# Altium schematic symbol library MyLibrary.SCHLIB: 89 symbols (part 3 of 3)
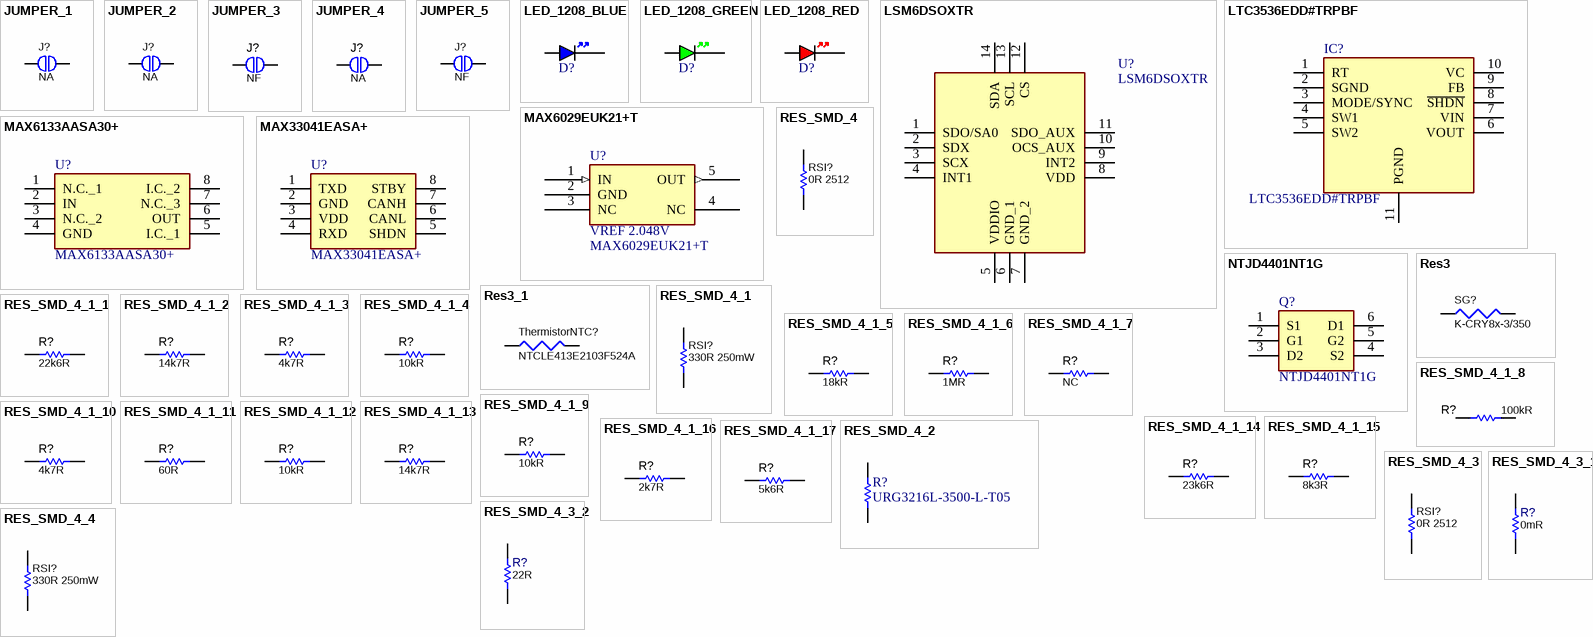
[diagram p4: symbols JUMPER_1 to RES_SMD_4_4]

## RES_SMD_4_3
designator RSI?, comment 0R 2512
Resistor SMD 6332mm (2512mil) 0Ohms 1W 5%; Manufacturer: Bourns; Manufacturer Part Number: CR2512-J/-000ELF; Value: =Resistance; ComponentLink1Description: Manufacturer 1 Product Page; ComponentLink1URL: k; ComponentLink2Description: Manufacturer 1 Product Datasheet 1; ComponentLink2URL: k; ComponentLink3Description: Supplier 1 Product Page; ComponentLink3URL: k; ComponentLink4Description: Supplier 1 Product Datasheet 1; ComponentLink4URL: k; Category: Resistor; Height: *
simulation model RESISTOR (Resistor)
signal-integrity model Res
footprint RESC1608M (Chip Resistor, Body 1.6x0.8mm, IPC Low Density)
footprint RESC0603M (Footprint not found)
footprint RESC1005M (Chip Resistor, Body 1.1x0.5mm, IPC Low Density)
footprint RESC2012M (Chip Resistor, Body 2.0x1.3mm, IPC Low Density)
footprint RESC3216M (Chip Resistor, Body 3.2x1.6mm, IPC Low Density)
footprint RESC3225M (Chip Resistor, Body 3.2x2.5mm, IPC Low Density)
footprint RESC4532M (Chip Resistor, Body 4.5x3.2mm, IPC Low Density)
footprint RESC5025M (Chip Resistor, Body 5.0x2.5mm, IPC Low Density)
footprint RESC6332M (Chip Resistor, Body 6.3x3.2mm, IPC Low Density)
footprint RESC1005N (Chip Resistor, Body 1.1x0.5mm, IPC Medium Density)
pins: 1, 2

## RES_SMD_4_3_1
designator R?, comment value 0mR  (hidden comment: Resistor SMD 1005mm (0402mil) 0Ohms 62.5mW 5% 100ppm/oC 50V)
Manufacturer 1: Vishay; Manufacturer Part Number 1: CRCW04020000Z0ED; Power Rating: 63mW; Temperature Coefficient: 100ppm/°C; ComponentLink1Description: Manufacturer 1 Product Page; ComponentLink1URL: https://www.vishay.com/product?docid=20035; ComponentLink2Description: Manufacturer 1 Product Datasheet 1; ComponentLink2URL: https://www.vishay.com/docs/20035/dcrcwe3.pdf; ComponentLink3Description: Supplier 1 Product Page; ComponentLink3URL: https://www.mouser.com/ProductDetail/Vishay-Dale/CRCW04020000Z0ED?qs=OlqPY1Ciranv3qgeAHCodg%3D%3D; ComponentLink4Description: Supplier 1 Product Datasheet 1; ComponentLink4URL: https://www.mouser.com/datasheet/2/427/dcrcwe3-1762152.pdf; Category: Resistor; Supplier 1: Mouser; Supplier Part Number 1: 71-CRCW0402-0-E3; Mount: Surface Mount; Contact Plating: Tin; Case Code (Imperial): 0402; Case Code (Metric): 1005; Min Operating Temperature: -55°C; Max Operating Temperature: 155°C; Resistance: 0mR; Resistor Type: Thick Film; Termination: SMD/SMT; Number of Terminations: 2; Max Power Dissipation: 63mW; Voltage Rating (DC): 50V; Tolerance: 5%; Manufacturer: Vishay; Manufacturer Part Number: CRCW04020000Z0ED; ComponentLink5Description: Manufacturer 2 Product Page; ComponentLink6Description: Manufacturer 2 Product Datasheet 1; ComponentLink7Description: Supplier 2 Product Page; ComponentLink8Description: Supplier 2 Product Datasheet 1; ComponentLink5URL: k; ComponentLink6URL: k; ComponentLink7URL: k; ComponentLink8URL: k; Number of Pins: 2; Manufacturer 1 Product Datasheet 1: https://www.vishay.com/docs/20035/dcrcwe3.pdf; Manufacturer 1 Product Page: https://www.vishay.com/product?docid=20035; Manufacturer Product Datasheet: https://www.vishay.com/docs/20035/dcrcwe3.pdf; Manufacturer Product Page: https://www.vishay.com/product?docid=20035; Supplier 2: Mouser; Supplier Part Number 2: 71-CRCW04020000Z0EDC
simulation model RESISTOR (Resistor)
signal-integrity model Res
footprint RESC1608M (Chip Resistor, Body 1.6x0.8mm, IPC Low Density)
footprint RESC0603M (Footprint not found)
footprint RESC1005M (Footprint not found)
footprint RESC2012M (Chip Resistor, Body 2.0x1.3mm, IPC Low Density)
footprint RESC3216M (Chip Resistor, Body 3.2x1.6mm, IPC Low Density)
footprint RESC3225M (Chip Resistor, Body 3.2x2.5mm, IPC Low Density)
footprint RESC4532M (Chip Resistor, Body 4.5x3.2mm, IPC Low Density)
footprint RESC5025M (Chip Resistor, Body 5.0x2.5mm, IPC Low Density)
footprint RESC6332M (Chip Resistor, Body 6.3x3.2mm, IPC Low Density)
footprint RESC1005N
pins: 1, 2

## RES_SMD_4_3_2
designator R?, comment value 22R  (hidden comment: Resistor SMD 1005mm (0402mil) 22Ohms 62.5mW 5% 100ppm/oC 50V)
ComponentLink1Description: Manufacturer 1 Product Page; ComponentLink1URL: https://www.vishay.com/product?docid=20035; ComponentLink2Description: Manufacturer 1 Product Datasheet 1; ComponentLink2URL: https://www.vishay.com/docs/20035/dcrcwe3.pdf; ComponentLink3Description: Supplier 1 Product Page; ComponentLink3URL: https://www.mouser.com/ProductDetail/Vishay-Dale/CRCW04020000Z0ED?qs=OlqPY1Ciranv3qgeAHCodg%3D%3D; ComponentLink4Description: Supplier 1 Product Datasheet 1; ComponentLink4URL: https://www.mouser.com/datasheet/2/427/dcrcwe3-1762152.pdf; Resistance: 22R; ComponentLink5Description: Manufacturer 2 Product Page; ComponentLink6Description: Manufacturer 2 Product Datasheet 1; ComponentLink7Description: Supplier 2 Product Page; ComponentLink8Description: Supplier 2 Product Datasheet 1; ComponentLink5URL: k; ComponentLink6URL: k; ComponentLink7URL: k; ComponentLink8URL: k
simulation model RESISTOR (Resistor)
signal-integrity model Res
footprint RESC1608M (Chip Resistor, Body 1.6x0.8mm, IPC Low Density)
footprint RESC0603M (Footprint not found)
footprint RESC1005M (Footprint not found)
footprint RESC2012M (Chip Resistor, Body 2.0x1.3mm, IPC Low Density)
footprint RESC3216M (Chip Resistor, Body 3.2x1.6mm, IPC Low Density)
footprint RESC3225M (Chip Resistor, Body 3.2x2.5mm, IPC Low Density)
footprint RESC4532M (Chip Resistor, Body 4.5x3.2mm, IPC Low Density)
footprint RESC5025M (Chip Resistor, Body 5.0x2.5mm, IPC Low Density)
footprint RESC6332M (Chip Resistor, Body 6.3x3.2mm, IPC Low Density)
footprint RESC1005N
pins: 1, 2

## RES_SMD_4_4
designator RSI?, comment 330R 250mW
Resistor SMD 3216mm (1206mil) 330Ohms 250mW 1%; Manufacturer: YAGEO; Manufacturer Part Number: RT1206FRE07330RL; Value: =Resistance; ComponentLink1Description: Manufacturer 1 Product Page; ComponentLink1URL: k; ComponentLink2Description: Manufacturer 1 Product Datasheet 1; ComponentLink2URL: k; ComponentLink3Description: Supplier 1 Product Page; ComponentLink3URL: https://www.mouser.com/ProductDetail/YAGEO/RT1206FRE07330RL?qs=Fz%2FrpjPuTcGdAbr7NGqIFg%3D%3D; ComponentLink4Description: Supplier 1 Product Datasheet 1; ComponentLink4URL: https://www.mouser.com/datasheet/3/508/1/PYu-RT_1-to-0.01_RoHS_L_15.pdf; Category: Resistor; Height: *
simulation model RESISTOR (Resistor)
signal-integrity model Res
footprint RESC1608M (Chip Resistor, Body 1.6x0.8mm, IPC Low Density)
footprint RESC0603M (Chip Resistor, Body 0.6x0.3mm, IPC Low Density)
footprint RESC1005M (Chip Resistor, Body 1.1x0.5mm, IPC Low Density)
footprint RESC2012M (Chip Resistor, Body 2.0x1.3mm, IPC Low Density)
footprint RESC3216M (Chip Resistor, Body 3.2x1.6mm, IPC Low Density)
footprint RESC3225M (Chip Resistor, Body 3.2x2.5mm, IPC Low Density)
footprint RESC4532M (Chip Resistor, Body 4.5x3.2mm, IPC Low Density)
footprint RESC5025M (Chip Resistor, Body 5.0x2.5mm, IPC Low Density)
footprint RESC6332M (Chip Resistor, Body 6.3x3.2mm, IPC Low Density)
footprint RESC1005N (Chip Resistor, Body 1.1x0.5mm, IPC Medium Density)
pins: 1, 2

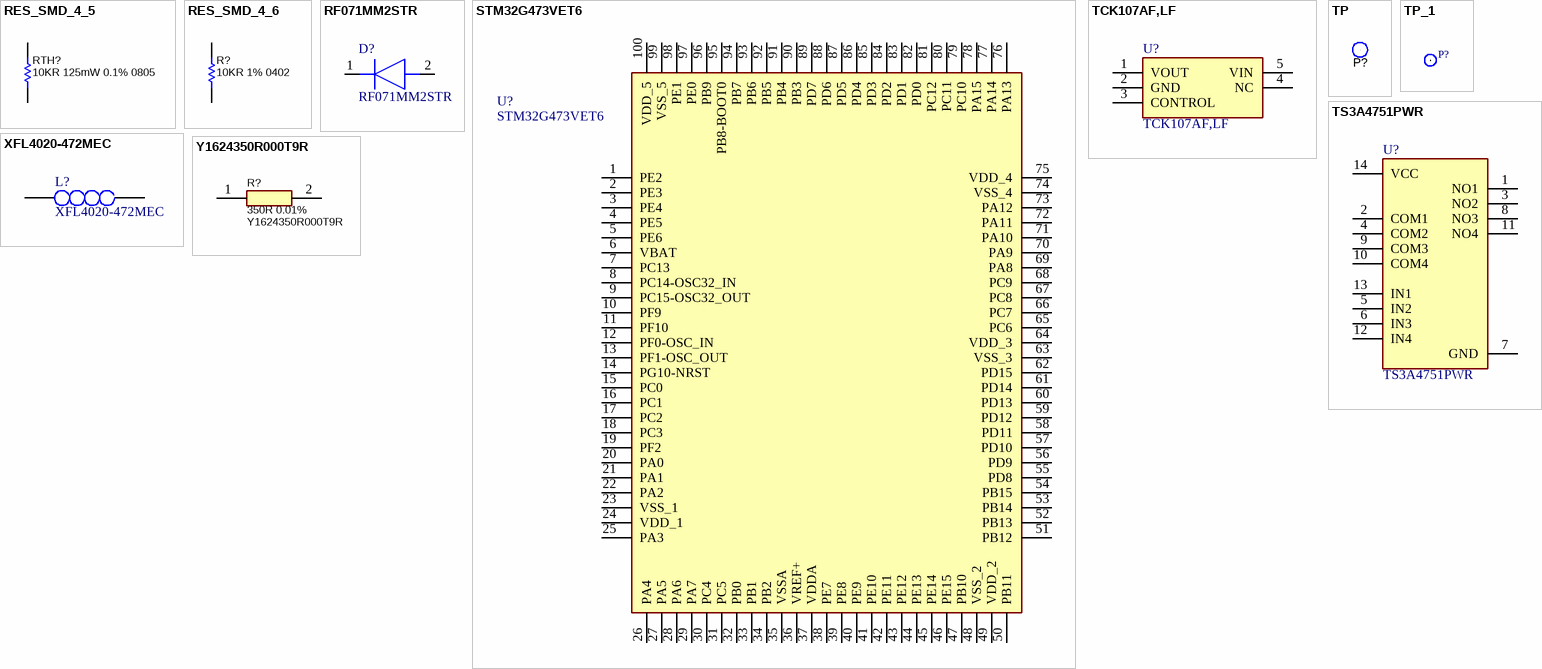
[diagram p2: symbols RES_SMD_4_5 to Y1624350R000T9R]

## RES_SMD_4_5
designator RTH?, comment 10KR 125mW 0.1% 0805
Resistor SMD 2012mm (0805mil) 10KOhms 125mW 0.1%; Manufacturer: Bourns; Manufacturer Part Number: CRT0805-BY-1002ELF; Value: =Resistance; ComponentLink1Description: Manufacturer 1 Product Page; ComponentLink1URL: k; ComponentLink2Description: Manufacturer 1 Product Datasheet 1; ComponentLink2URL: k; ComponentLink3Description: Supplier 1 Product Page; ComponentLink3URL: https://www.mouser.com/ProductDetail/Bourns/CRT0805-BY-1002ELF?qs=h2IHEVivlqCjNQtH%252BVLkLw%3D%3D; ComponentLink4Description: Supplier 1 Product Datasheet 1; ComponentLink4URL: https://www.mouser.com/datasheet/3/40/1/CRT.pdf; Category: Resistor; Height: *; Manufacturer Product Datasheet: https://www.bourns.com/docs/Product-Datasheets/crt.pdf; Manufacturer 1 Product Datasheet 1: https://www.bourns.com/docs/Product-Datasheets/crt.pdf
simulation model RESISTOR (Resistor)
signal-integrity model Res
footprint RESC1608M (Chip Resistor, Body 1.6x0.8mm, IPC Low Density)
footprint RESC0603M (Footprint not found)
footprint RESC1005M (Chip Resistor, Body 1.1x0.5mm, IPC Low Density)
footprint RESC2012M (Chip Resistor, Body 2.0x1.3mm, IPC Low Density)
footprint RESC3216M (Chip Resistor, Body 3.2x1.6mm, IPC Low Density)
footprint RESC3225M (Chip Resistor, Body 3.2x2.5mm, IPC Low Density)
footprint RESC4532M (Chip Resistor, Body 4.5x3.2mm, IPC Low Density)
footprint RESC5025M (Chip Resistor, Body 5.0x2.5mm, IPC Low Density)
footprint RESC6332M (Chip Resistor, Body 6.3x3.2mm, IPC Low Density)
footprint RESC1005N (Chip Resistor, Body 1.1x0.5mm, IPC Medium Density)
pins: 1, 2

## RES_SMD_4_6
designator R?, comment 10KR 1% 0402
Resistor SMD 1005mm (0402mil) 10KOhms 65mW 1%; Manufacturer: Bourns; Value: =Resistance; ComponentLink1Description: Manufacturer 1 Product Page; ComponentLink1URL: k; ComponentLink2Description: Manufacturer 1 Product Datasheet 1; ComponentLink2URL: k; ComponentLink3Description: Supplier 1 Product Page; ComponentLink3URL: https://www.mouser.com/ProductDetail/Bourns/CRT0805-BY-1002ELF?qs=h2IHEVivlqCjNQtH%252BVLkLw%3D%3D; ComponentLink4Description: Supplier 1 Product Datasheet 1; ComponentLink4URL: https://www.mouser.com/datasheet/3/40/1/CRT.pdf; Category: Resistor; Height: *; Manufacturer Product Datasheet: https://www.bourns.com/docs/Product-Datasheets/crt.pdf; Manufacturer 1 Product Datasheet 1: https://www.bourns.com/docs/Product-Datasheets/crt.pdf
simulation model RESISTOR (Resistor)
signal-integrity model Res
footprint RESC1608M (Chip Resistor, Body 1.6x0.8mm, IPC Low Density)
footprint RESC0603M (Footprint not found)
footprint RESC1005M (Footprint not found)
footprint RESC2012M (Chip Resistor, Body 2.0x1.3mm, IPC Low Density)
footprint RESC3216M (Chip Resistor, Body 3.2x1.6mm, IPC Low Density)
footprint RESC3225M (Chip Resistor, Body 3.2x2.5mm, IPC Low Density)
footprint RESC4532M (Chip Resistor, Body 4.5x3.2mm, IPC Low Density)
footprint RESC5025M (Chip Resistor, Body 5.0x2.5mm, IPC Low Density)
footprint RESC6332M (Chip Resistor, Body 6.3x3.2mm, IPC Low Density)
footprint RESC1005N
pins: 1, 2

## RF071MM2STR
designator D?
Diode; Manufacturer_Name: ROHM Semiconductor; Datasheet Link: https://fscdn.rohm.com/en/products/databook/datasheet/discrete/diode/fast_recovery/rf071mm2s-e.pdf; Height: 0.9mm; Manufacturer_Part_Number: RF071MM2STR; Mouser Part Number: 755-RF071MM2STR; Mouser Price/Stock: https://www.mouser.co.uk/ProductDetail/ROHM-Semiconductor/RF071MM2STR?qs=pXoXL5qUNJ3VSfU51WV3MA%3D%3D
footprint RF071MM2STR
pins: 1 K, 2 A

## STM32G473VET6
designator U?
Integrated Circuit; Manufacturer_Name: STMicroelectronics; Datasheet Link: https://www.st.com/resource/en/datasheet/stm32g473cb.pdf; Height: 1.6mm; Manufacturer_Part_Number: STM32G473VET6; Mouser Part Number: 511-STM32G473VET6; Mouser Price/Stock: https://www.mouser.co.uk/ProductDetail/STMicroelectronics/STM32G473VET6?qs=PzGy0jfpSMuOfCPr1WW9ZQ%3D%3D; Arrow Part Number: STM32G473VET6; Arrow Price/Stock: https://www.arrow.com/en/products/stm32g473vet6/stmicroelectronics?region=nac
footprint QFP50P1600X1600X160-100N
pins: 1 PE2, 2 PE3, 3 PE4, 4 PE5, 5 PE6, 6 VBAT, 7 PC13, 8 PC14-OSC32_IN, 9 PC15-OSC32_OUT, 10 PF9, 11 PF10, 12 PF0-OSC_IN, 13 PF1-OSC_OUT, 14 PG10-NRST, 15 PC0, 16 PC1, 17 PC2, 18 PC3, 19 PF2, 20 PA0, 21 PA1, 22 PA2, 23 VSS_1, 24 VDD_1, 25 PA3, 26 PA4, 27 PA5, 28 PA6, 29 PA7, 30 PC4, 31 PC5, 32 PB0, 33 PB1, 34 PB2, 35 VSSA, 36 VREF+, 37 VDDA, 38 PE7, 39 PE8, 40 PE9, 41 PE10, 42 PE11, 43 PE12, 44 PE13, 45 PE14, 46 PE15, 47 PB10, 48 VSS_2, 49 VDD_2, 50 PB11, 51 PB12, 52 PB13, 53 PB14, 54 PB15, 55 PD8, 56 PD9, 57 PD10, 58 PD11, 59 PD12, 60 PD13, 61 PD14, 62 PD15, 63 VSS_3, 64 VDD_3, 65 PC6, 66 PC7, 67 PC8, 68 PC9, 69 PA8, 70 PA9, 71 PA10, 72 PA11, 73 PA12, 74 VSS_4, 75 VDD_4, 76 PA13, 77 PA14, 78 PA15, 79 PC10, 80 PC11, 81 PC12, 82 PD0, 83 PD1, 84 PD2, 85 PD3, 86 PD4, 87 PD5, 88 PD6, 89 PD7, 90 PB3, 91 PB4, 92 PB5, 93 PB6, 94 PB7, 95 PB8-BOOT0, 96 PB9, 97 PE0, 98 PE1, 99 VSS_5, 100 VDD_5

## TCK107AF,LF
designator U?
Integrated Circuit; Manufacturer_Name: Toshiba; Datasheet Link: http://toshiba.semicon-storage.com/info/docget.jsp?did=53240&prodName=TCK107AF; Manufacturer_Part_Number: TCK107AF,LF; Mouser Part Number: 757-TCK107AFLF; Mouser Price/Stock: https://www.mouser.co.uk/ProductDetail/Toshiba/TCK107AFLF?qs=PDgMCp4xDJb6E2j34dL1GA%3D%3D; Arrow Part Number: TCK107AF,LF; Arrow Price/Stock: https://www.arrow.com/en/products/tck107aflf/toshiba?region=nac
footprint SMV_1
pins: 1 VOUT, 2 GND, 3 CONTROL, 4 NC, 5 VIN

## TP
designator P?  (value not drawn)  (no BOM)
Test Point, Test Pad, Test Via, Connection Point; ComponentLink1Description: Manufacturer 1 Product Page; ComponentLink1URL: k; ComponentLink2Description: Manufacturer 1 Product Dataheet 1; ComponentLink2URL: k; ComponentLink3Description: Supplier 1 Product Page; ComponentLink3URL: k; ComponentLink4Description: Supplier 1 Product Datasheet 1; ComponentLink4URL: k
footprint PAD_C100 (PAD Circular 1.00 mm diameter, Past Mask -100)
footprint PAD_C150 (PAD Circular 1.50 mm diameter, Past Mask -150)
footprint PAD_C160H90 (PAD Circular Diameter 1.6mm, Hole Circular Diameter 0.9mm (For 2.54 x 2.54 mm spacing))
footprint PAD_C200 (PAD Circular 2.00 mm diameter, Past Mask -200)
pins: 1

## TP_1
designator P?, comment TP  (value not drawn)  (no BOM)
Test Point
footprint PAD_C100 (PAD Circular 1.00 mm diameter, Past Mask -100)
footprint PAD_C150 (PAD Circular 1.50 mm diameter)
footprint PAD_C200 (PAD Circular 2.00 mm diameter)
pins: 1

## TS3A4751PWR
designator U?
Integrated Circuit; Manufacturer_Name: Texas Instruments; Datasheet Link: http://www.ti.com/lit/ds/symlink/ts3a4751.pdf; Height: 1.2mm; Manufacturer_Part_Number: TS3A4751PWR; Mouser Part Number: 595-TS3A4751PWR; Mouser Price/Stock: https://www.mouser.co.uk/ProductDetail/Texas-Instruments/TS3A4751PWR?qs=7kv20MEVUlhmaEkcoyao6g%3D%3D; Arrow Part Number: TS3A4751PWR; Arrow Price/Stock: https://www.arrow.com/en/products/ts3a4751pwr/texas-instruments?region=nac
footprint SOP65P640X120-14N
pins: 1 NO1, 2 COM1, 3 NO2, 4 COM2, 5 IN2, 6 IN3, 7 GND, 8 NO3, 9 COM3, 10 COM4, 11 NO4, 12 IN4, 13 IN1, 14 VCC

## XFL4020-472MEC
designator L?
Inductor; Manufacturer_Name: COILCRAFT; Datasheet Link: https://componentsearchengine.com/Datasheets/2/XFL4020-472MEC.pdf; Height: 2.1mm; Manufacturer_Part_Number: XFL4020-472MEC; Mouser Part Number: 994-XFL4020-472MEC; Mouser Price/Stock: https://www.mouser.co.uk/ProductDetail/Coilcraft/XFL4020-472MEC?qs=zCSbvcPd3pYTqnxfKsElWw%3D%3D
footprint XFL4020472MEC
pins: 1, 2

## Y1624350R000T9R
designator R?  value 350R 0.01%
Resistor; Manufacturer_Name: Vishay; Datasheet Link: https://componentsearchengine.com/Datasheets/1/Y1624350R000T9R.pdf; Height: 0.64mm; Manufacturer_Part_Number: Y1624350R000T9R; Mouser Part Number: N/A; Mouser Price/Stock: https://www.mouser.co.uk/ProductDetail/Vishay/Y1624350R000T9R?qs=QpmGXVUTftHMP0XVIUf92Q%3D%3D; Arrow Part Number: Y1624350R000T9R; Arrow Price/Stock: https://www.arrow.com/en/products/y1624350r000t9r/vishay-precision-group?region=nac
footprint RESC2013X64N
pins: 1, 2